# Altium footprint library 213_Final_Project.PcbLib: 56 footprints (part 2 of 4)
Each footprint in its own frame and in the unit in brackets; x right, y up, seen from the top. Pads: shape width x height; smd on the part's side, far side on the other; paste and mask are expansions set on the pad; w line width, h text height; cw(c..) or ccw(c..) is an arc to the next point about the centre after c.
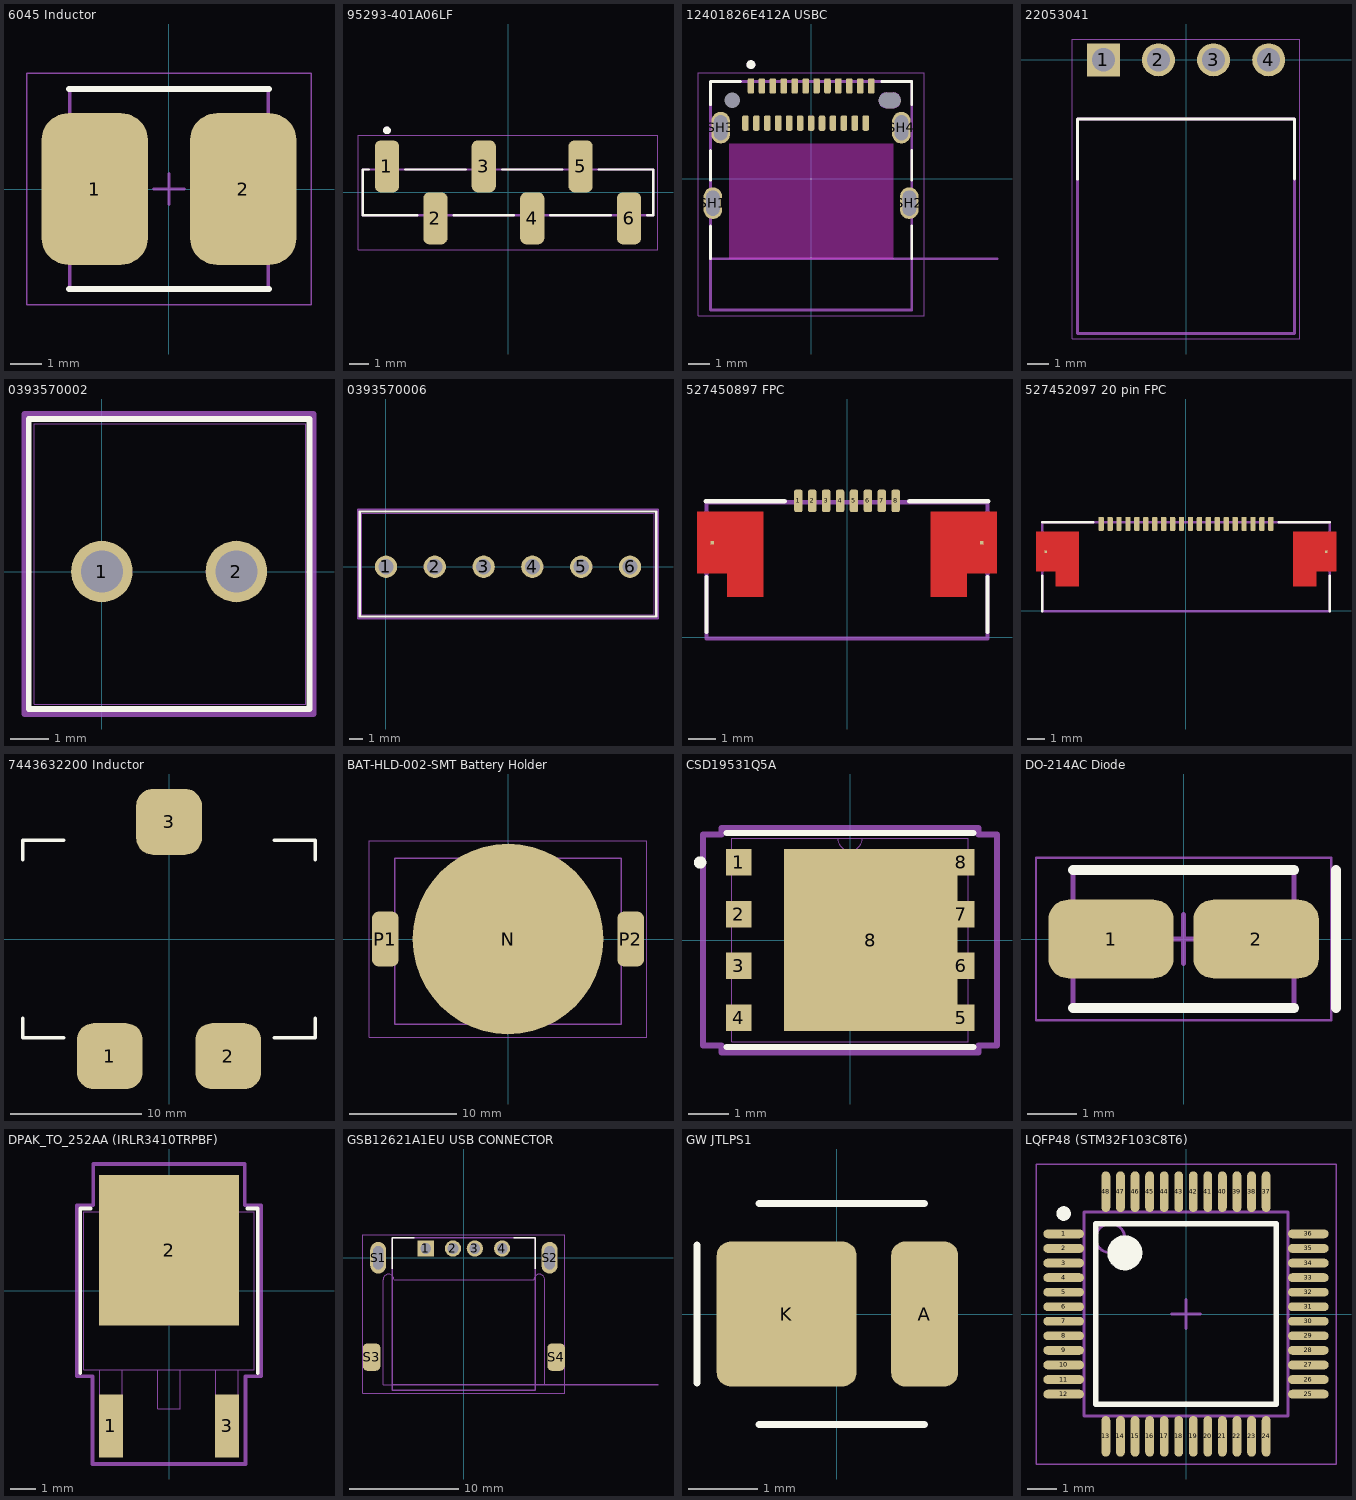
[diagram p1: the footprints below, top view; thin cyan lines are the x and y axes]

## 6045 Inductor [mm] "Precision Wire Wound Inductor, 2-Leads, Body 6.00x6.00mm, IPC Low Density"
height 4.5
pads (2):
  rrect50% 3.4x4.85 smd: 1(-2.375,0) 2(2.375,0)
Top Overlay:
  lines w0.2: -3.2,-3.2 3.2,-3.2 ; -3.2,3.2 3.2,3.2
Mechanical 13:
  lines w0.1: -3.175,-3.175 3.175,-3.175 3.175,3.175 -3.175,3.175 -3.175,-3.175
Mechanical 15:
  lines w0.05: -4.55,-3.7 4.55,-3.7 4.55,3.7 -4.55,3.7 -4.55,-3.7
  lines w0.1: -0.5,0 0.5,0 ; 0,-0.5 0,0.5
3D body "PNR6045 (Generic).STEP": height 4.05, standoff 0, extent -3,-2.99 3,3.005

## 95293-401A06LF [mm]
height 9.85
pads (6):
  rrect50% 1.27x2.73 smd: 1(-6.35,1.365) 2(-3.81,-1.365) 3(-1.27,1.365) 4(1.27,-1.365) 5(3.81,1.365) 6(6.35,-1.365)
Top Overlay:
  circle w0.2: c-6.35,3.25 r0.1
  lines w0.127: -7.305,1.2 -7.62,1.2 -7.62,-1.2 -4.765,-1.2 ; -5.395,1.2 -2.225,1.2 ; -2.855,-1.2 0.315,-1.2 ; -0.315,1.2 2.855,1.2 ; 2.225,-1.2 5.395,-1.2 ; 4.765,1.2 7.62,1.2 7.62,-1.2 7.305,-1.2
Mechanical 13:
  circle w0.2: c-6.35,3.25 r0.1
  lines w0.127: -7.62,-1.2 -7.62,1.2 7.62,1.2 7.62,-1.2 -7.62,-1.2
Mechanical 15:
  lines w0.05: -7.87,-3 -7.87,3 7.87,3 7.87,-3 -7.87,-3
3D body "95293-401A06LF.STEP": height 9.65, standoff 0, extent -7.62,-2.415 7.62,2.415

## 12401826E412A USBC [mm]
pads (30):
  rrect50% 0.3x0.7 smd mask+0.049: A1(-2.75,4.25) A2(-2.25,4.25) A3(-1.75,4.25) A4(-1.25,4.25) A5(-0.75,4.25) A6(-0.25,4.25) A7(0.25,4.25) A8(0.75,4.25) A9(1.25,4.25) A10(1.75,4.25) A11(2.25,4.25) A12(2.75,4.25) B1(2.5,2.55) B2(2,2.55) B3(1.5,2.55) B4(1,2.55) B5(0.5,2.55) B6(0,2.55) B7(-0.5,2.55) B8(-1,2.55) B9(-1.5,2.55) B10(-2,2.55) B11(-2.5,2.55) B12(-3,2.55)
  oval 0.85x1.45 hole 0.62 slot 1.15 at 90 deg: SH1(-4.49,-1.11) SH2(4.49,-1.11)
  oval 0.85x1.45 hole 0.62 slot 1.15 at 90 deg mask+0.05: SH3(-4.13,2.34) SH4(4.13,2.34)
  round 0 / inner round 0.9 / far side round 0 hole 0.7 unplated mask+0.05: ""(-3.6,3.59)
  round 0 / inner round 0.9 / far side round 0 hole 0.7 slot 1 at 0 deg unplated mask+0.05: ""(3.6,3.59)
Top Overlay:
  circle w0.2: c-2.75,5.225 r0.1
  lines w0.127: -4.6,-3.65 -4.6,-2.155 ; -4.6,-0.065 -4.6,1.295 ; -4.6,3.385 -4.6,4.45 -3.23,4.45 ; 3.23,4.45 4.6,4.45 4.6,3.385 ; 4.6,-3.65 4.6,-2.155 ; 4.6,-0.065 4.6,1.295
Keep-Out Layer:
  region: 3.75,-3.65 -3.75,-3.65 -3.75,1.6 3.75,1.6
Mechanical 1:
  lines w0: 3.1,3.59 cw(c3.437,3.59) 3.437,3.928 3.762,3.928 cw(c3.762,3.59) 4.1,3.59 cw(c3.762,3.59) 3.762,3.253 3.437,3.253 cw(c3.437,3.59) 3.1,3.59
Mechanical 13:
  circle w0.2: c-2.75,5.225 r0.1
  lines w0.127: 8.5,-3.65 -4.6,-3.65 ; -4.6,-3.65 -4.6,4.45 4.6,4.45 4.6,-6 -4.6,-6 -4.6,-3.65
  text "PCB Edge" at 5.45,-3.375 h0.81
Mechanical 15:
  lines w0.05: -5.165,-6.25 5.165,-6.25 5.165,4.85 -5.165,4.85 -5.165,-6.25
3D body "12401826E412A.stp": height 3.3, standoff -1.88, extent -4.6,-6 4.6,4.5

## 22053041 [mil]
pads (4):
  rect 60x60 / inner round 60 / far side rect 60x60 hole 42.13 mask+4.02: 1(-150,0)
  round 60 hole 42.13 mask+4.02: 2(-50,0) 3(50,0) 4(150,0)
Top Overlay:
  lines w5: -197.05,-216.97 -197.05,-107.5 197.05,-107.5 197.05,-216.54
Mechanical 13:
  lines w5: -197.05,-496.87 -197.05,-232.7 -197.05,-107.5 197.05,-107.5 197.05,-232.7 197.05,-496.87 -197.05,-496.87
Mechanical 15:
  lines w1.97: -206.89,-506.71 -206.89,37.8 206.89,37.8 206.89,-506.71 -206.89,-506.71
3D body "0022053041.stp": height 250.98, standoff -140.02, extent -197,-495.79 197,13.21

## 0393570002 [mil]
pads (2):
  round 63 hole 43 paste-99999 mask+0: 1(0,0) 2(137.8,0)
Top Overlay:
  lines w6: -74.8,-140.82 212.6,-140.82 212.6,156.18 -74.8,156.18 -74.8,-140.82
Mechanical 13:
  lines w1: -69.01,-135.82 -69.01,151.18 208.66,151.18 208.66,-135.82 -69.01,-135.82
Mechanical 15:
  lines w6: -79.01,-145.82 -79.01,161.18 216.54,161.18 216.54,-145.82 -79.01,-145.82
3D body "393570002.stp": height 335, standoff -138, extent -71,-136 209,151

## 0393570006 [mil]
pads (6):
  round 63 hole 43 paste-99999 mask+0: 1(0,0) 2(137.8,0) 3(275.59,0) 4(413.39,0) 5(551.18,0) 6(688.98,0)
Top Overlay:
  lines w6: -74.01,-140.82 762.99,-140.82 762.99,156.18 -74.01,156.18 -74.01,-140.82
Mechanical 13:
  lines w1: -69.01,-135.82 757.99,-135.82 757.99,151.18 -69.01,151.18 -69.01,-135.82
Mechanical 15:
  lines w6: -79.01,-145.82 -79.01,161.18 767.99,161.18 767.99,-145.82 -79.01,-145.82
3D body "393570006.stp": height 335, standoff -138, extent -70,-136 760,151

## 527450897 FPC [mil]
pads (10):
  rrect50% 12x32 smd mask+4: 1(-68.9,192.79) 2(-49.21,192.79) 3(-29.53,192.79) 4(-9.84,192.79) 5(9.84,192.79) 6(29.53,192.79) 7(49.21,192.79) 8(68.9,192.79)
  rect 5x5 smd: P1(-190.94,133.73) P2(190.94,133.73)
Top Layer:
  region: -118.44,57.17 -169.44,57.17 -169.44,90.23 -212.44,90.23 -212.44,177.23 -118.44,177.23
  region: 212.44,90.23 169.44,90.23 169.44,57.17 118.44,57.17 118.44,177.23 212.44,177.23
Top Overlay:
  lines w6: -200,192.17 -88,192.17 ; -199,7.17 -199,85.17 ; 88,192.17 200,192.17 ; 199,7.17 199,85.17
Top Paste:
  region: 212.44,90.23 169.44,90.23 169.44,57.17 118.44,57.17 118.44,177.23 212.44,177.23
  region: -118.44,57.17 -169.44,57.17 -169.44,90.23 -212.44,90.23 -212.44,177.23 -118.44,177.23
Top Solder:
  region: 212.44,90.23 169.44,90.23 169.44,57.17 118.44,57.17 118.44,177.23 212.44,177.23
  region: -118.44,57.17 -169.44,57.17 -169.44,90.23 -212.44,90.23 -212.44,177.23 -118.44,177.23
Mechanical 13:
  lines w6: -199,-1.89 199,-1.89 199,191.02 -199,191.02 -199,-1.89
3D body "0527450897.stp": height 75, standoff 0, extent -198.82,-1.89 198.82,194.96

## 527452097 20 pin FPC [mm]
pads (22):
  rrect50% 0.3x0.8 smd: 1(-4.75,4.868) 2(-4.25,4.868) 3(-3.75,4.868) 4(-3.25,4.868) 5(-2.75,4.868) 6(-2.25,4.868) 7(-1.75,4.868) 8(-1.25,4.868) 9(-0.75,4.868) 10(-0.25,4.868) 11(0.25,4.868) 12(0.75,4.868) 13(1.25,4.868) 14(1.75,4.868) 15(2.25,4.868) 16(2.75,4.868) 17(3.25,4.868) 18(3.75,4.868) 19(4.25,4.868) 20(4.75,4.868)
  rect 0.127x0.127 smd: P1(-7.85,3.313) P2(7.85,3.313)
Top Layer:
  region: -6.008,1.368 -7.304,1.368 -7.304,2.208 -8.396,2.208 -8.396,4.418 -6.008,4.418
  region: 8.396,2.208 7.304,2.208 7.304,1.368 6.009,1.368 6.009,4.418 8.396,4.418
Top Overlay:
  lines w0.152: -8.052,-0.021 -8.052,1.96 ; -8.052,4.957 -5.207,4.957 ; 5.207,4.957 8.052,4.957 ; 8.052,-0.021 8.052,1.96
Top Paste:
  region: -6.008,1.368 -7.304,1.368 -7.304,2.208 -8.396,2.208 -8.396,4.418 -6.008,4.418
  region: 8.396,2.208 7.304,2.208 7.304,1.368 6.009,1.368 6.009,4.418 8.396,4.418
Top Solder:
  region: -6.008,1.368 -7.304,1.368 -7.304,2.208 -8.396,2.208 -8.396,4.418 -6.008,4.418
  region: 8.396,2.208 7.304,2.208 7.304,1.368 6.009,1.368 6.009,4.418 8.396,4.418
Mechanical 13:
  lines w0.152: -8.052,-0.021 8.052,-0.021 8.052,4.957 -8.052,4.957 -8.052,-0.021
3D body "0527452097.stp": height 1.91, standoff 0, extent -8.05,-0.11 8.05,4.89

## 7443632200 Inductor [mm]
pads (3):
  rrect50% 5x5 smd: 1(-4.5,-8.9) 2(4.5,-8.9) 3(0,8.9)
Top Overlay:
  lines w0.254: -11.128,-5.998 -11.128,-7.498 -8.003,-7.498 ; -11.125,6 -11.125,7.5 -8,7.5 ; 8,-7.5 11.125,-7.5 11.125,-6 ; 8,7.5 11.125,7.5 11.125,6
3D body "7443632200.stp": height 14, standoff 0, extent -10.75,-10.6 10.75,10.4

## BAT-HLD-002-SMT Battery Holder [mm]
pads (3):
  round 17.8 smd paste-10: N(0,0)
  rrect50% 2.5x5.1 smd: P1(-11.45,0) P2(11.45,0)
Mechanical 13:
  lines w0.127: -10.55,-7.95 -10.55,7.55 10.55,7.55 10.55,-7.95 -10.55,-7.95
Mechanical 15:
  lines w0.05: -12.95,-9.15 -12.95,9.15 12.95,9.15 12.95,-9.15 -12.95,-9.15
3D body "BAT-HLD-002-SMT.STEP": height 2.79, standoff 0, extent -11.43,-7.872 11.43,7.622

## CSD19531Q5A [mm]
pads (9):
  rect 0.63x0.65 smd paste-0.1 mask-0.33: 1(-2.735,1.905) 2(-2.735,0.635) 3(-2.735,-0.635) 4(-2.735,-1.905) 5(2.735,-1.905) 6(2.735,-0.635) 7(2.735,0.635) 8(2.735,1.905)
  rect 4.26x4.46 smd paste-0.1 mask-0.33: 8(0.508,0)
Top Overlay:
  circle w0.152: c-3.683,1.905 r0.076
  lines w0.152: -3.027,-2.627 3.027,-2.627 ; -3.027,2.627 3.027,2.627
Top Paste:
  region: 0.32,-1.88 0.32,-0.31 1.905,-0.31 1.905,-1.88
  region: 0.32,1.88 0.32,0.31 1.905,0.31 1.905,1.88
  region: -0.18,1.88 -0.18,0.31 -1.415,0.31 -1.415,1.88
  region: -0.18,-1.88 -0.18,-0.31 -1.415,-0.31 -1.415,-1.88
Top Solder:
  region: -2.35,2.3 -3.12,2.3 -3.12,1.51 -2.35,1.51
  region: -2.35,1.03 -3.12,1.03 -3.12,0.24 -2.35,0.24
  region: -2.35,-0.24 -3.12,-0.24 -3.12,-1.03 -2.35,-1.03
  region: -2.35,-1.51 -3.12,-1.51 -3.12,-2.3 -2.35,-2.3
  region: 3.12,-1.51 2.35,-1.51 2.35,-2.3 3.12,-2.3
  region: 3.12,-0.24 2.35,-0.24 2.35,-1.03 3.12,-1.03
  region: 3.12,1.03 2.35,1.03 2.35,0.24 3.12,0.24
  region: 3.12,2.3 2.35,2.3 2.35,1.51 3.12,1.51
  region: 2.745,0 2.745,2.23 -1.545,2.23 -1.545,0
  region: 2.745,0 2.745,-2.23 -1.545,-2.23 -1.545,0
Mechanical 13:
  circle w0.025: c-2.725,1.905 r0.076
  lines w0.025: -0.305,2.5 ccw(c0,2.5) 0.305,2.5 ; -2.9,-2.5 2.9,-2.5 2.9,2.5 -2.9,2.5 -2.9,-2.5
Mechanical 15:
  lines w0.152: -3.609,-2.591 -3.609,2.591 -3.154,2.591 -3.154,2.754 3.154,2.754 3.154,2.591 3.609,2.591 3.609,-2.591 3.154,-2.591 3.154,-2.754 -3.154,-2.754 -3.154,-2.591 -3.609,-2.591
3D body "CSD19531Q5A.stp": height 1.05, standoff 0, extent -3,-2.55 3,2.55

## DO-214AC Diode [mm] "Molded Diode, 2-Leads, Body 4.15x2.55mm, IPC Medium Density"
height 2.45
pads (2):
  rrect50% 2.55x1.6 smd: 1(-1.475,0) 2(1.475,0)
Top Overlay:
  lines w0.2: -2.25,-1.4 2.25,-1.4 ; -2.25,1.4 2.25,1.4 ; 3.1,-1.4 3.1,1.4
Mechanical 13:
  lines w0.1: -2.25,-1.4 2.25,-1.4 2.25,1.4 -2.25,1.4 -2.25,-1.4
Mechanical 15:
  lines w0.05: -3,-1.65 3,-1.65 3,1.65 -3,1.65 -3,-1.65
  lines w0.1: -0.5,0 0.5,0 ; 0,-0.5 0,0.5
3D body "DO214AC.STEP": height 2.29, standoff -0.01, extent -2.6,-1.3 2.6,1.3

## DPAK_TO_252AA (IRLR3410TRPBF) [mil]
pads (3):
  rect 37x98 smd paste+0 mask+0: 1(-90,-209.5) 3(90,-209.5)
  rect 217x233 smd paste+0 mask+0: 2(0,63)
Top Overlay:
  lines w6: -137.5,-127.5 -137.5,127.5 -121.6,127.5 ; 121.6,127.5 137.5,127.5 137.5,-127.5
Mechanical 13:
  lines w1: -132.5,-122.5 132.5,-122.5 132.5,122.5 -132.5,122.5 -132.5,-122.5 ; -107.5,-244.5 -107.5,-122.5 -72.5,-122.5 -72.5,-244.5 -107.5,-244.5 ; -17.5,-182.5 -17.5,-122.5 17.5,-122.5 17.5,-182.5 -17.5,-182.5 ; 72.5,-244.5 72.5,-122.5 107.5,-122.5 107.5,-244.5 72.5,-244.5
Mechanical 15:
  lines w6: -142.5,-132.5 -142.5,132.5 -117.5,132.5 -117.5,196.5 117.5,196.5 117.5,132.5 142.5,132.5 142.5,-132.5 118.5,-132.5 118.5,-268.5 -118.5,-268.5 -118.5,-132.5 -142.5,-132.5
3D body "DPAK_TO-252 (IRLR3410TRPBF).step": height 94.09, standoff -2.01, extent -132.52,-244.49 132.52,165.51

## GSB12621A1EU USB CONNECTOR [mm]
pads (8):
  rect 1.488x1.488 hole 0.98 mask+0.102: 1(-3.5,0.85)
  round 1.488 hole 0.98 mask+0.102: 2(-1,0.85) 3(1,0.85) 4(3.5,0.85)
  oval 1.458x2.916 hole 0.95 slot 2.15 at 90 deg mask+0.102: S1(-7.85,0) S2(7.85,0)
  rrect50% 1.6x2.5 smd paste+0 mask+0.102: S3(-8.45,-9.1) S4(8.45,-9.1)
Top Overlay:
  lines w0.127: -6.55,-1 -6.55,1.85 -4.564,1.85 ; 4.564,1.85 6.55,1.85 6.55,-1
Mechanical 13:
  lines w0: -7.4,-11.65 7.4,-11.65 7.4,-2 ccw(c6.9,-2) 6.4,-2 -6.4,-2 ccw(c-6.9,-2) -7.4,-2 -7.4,-11.65
  lines w0.127: 17.78,-11.65 -6.55,-11.65 ; -6.55,-11.65 -6.55,1.85 6.55,1.85 6.55,-12.15 -6.55,-12.15 -6.55,-11.65
  text "PCB Edge" at 9.652,-11.303 h1.27
Mechanical 15:
  lines w0.05: -9.25,-12.4 9.25,-12.4 9.25,2.1 -9.25,2.1 -9.25,-12.4
3D body "664_GSB12621A1EU.stp": height 4.32, standoff -2.59, extent -8.6,-12.15 8.6,1.85

## GW JTLPS1 [mm]
pads (2):
  rrect40% 0.97x2.1 smd: A(1.275,0)
  rrect20% 2.03x2.1 smd: K(-0.725,0)
Top Overlay:
  lines w0.1: -2.025,-1 -2.025,1 ; -1.125,-1.6 1.275,-1.6 ; -1.125,1.6 1.275,1.6
3D body "LED 2835.stp": height 1.61, standoff 0, extent -1.725,-1.4 1.775,1.4

## LQFP48 (STM32F103C8T6) [mm] "TSQFP, 48-Leads, Body 7.00x7.00mm, Pitch 0.50mm, IPC Medium Density"
height 1.6
pads (48):
  oval 1.4x0.3 smd: 1(-4.2,2.75) 2(-4.2,2.25) 3(-4.2,1.75) 4(-4.2,1.25) 5(-4.2,0.75) 6(-4.2,0.25) 7(-4.2,-0.25) 8(-4.2,-0.75) 9(-4.2,-1.25) 10(-4.2,-1.75) 11(-4.2,-2.25) 12(-4.2,-2.75) 25(4.2,-2.75) 26(4.2,-2.25) 27(4.2,-1.75) 28(4.2,-1.25) 29(4.2,-0.75) 30(4.2,-0.25) 31(4.2,0.25) 32(4.2,0.75) 33(4.2,1.25) 34(4.2,1.75) 35(4.2,2.25) 36(4.2,2.75)
  oval 0.3x1.4 smd: 13(-2.75,-4.2) 14(-2.25,-4.2) 15(-1.75,-4.2) 16(-1.25,-4.2) 17(-0.75,-4.2) 18(-0.25,-4.2) 19(0.25,-4.2) 20(0.75,-4.2) 21(1.25,-4.2) 22(1.75,-4.2) 23(2.25,-4.2) 24(2.75,-4.2) 37(2.75,4.2) 38(2.25,4.2) 39(1.75,4.2) 40(1.25,4.2) 41(0.75,4.2) 42(0.25,4.2) 43(-0.25,4.2) 44(-0.75,4.2) 45(-1.25,4.2) 46(-1.75,4.2) 47(-2.25,4.2) 48(-2.75,4.2)
Top Overlay:
  circle w0.25: c-4.2,3.45 r0.125
  circle w0.6: c-2.1,2.1 r0.3
  lines w0.2: -3.1,-3.1 -3.1,3.1 3.1,3.1 3.1,-3.1 -3.1,-3.1
Mechanical 13:
  circle w0.1: c-2.6,2.6 r0.5
  lines w0.1: -3.5,-3.5 -3.5,3.5 3.5,3.5 3.5,-3.5 -3.5,-3.5
Mechanical 15:
  lines w0.05: -5.15,-5.15 -5.15,5.15 5.15,5.15 5.15,-5.15 -5.15,-5.15
  lines w0.1: -0.5,0 0.5,0 ; 0,-0.5 0,0.5
3D body "LQFP48 (STM32F103C8T6).step": height 1.6, standoff 0, extent -4.597,-4.597 4.597,4.597